# Altium footprint library PcbLib.PcbLib: 162 footprints (part 11 of 11)
Each footprint in its own frame and in the unit in brackets; x right, y up, seen from the top. Pads: shape width x height; smd on the part's side, far side on the other; paste and mask are expansions set on the pad; w line width, h text height; cw(c..) or ccw(c..) is an arc to the next point about the centre after c.
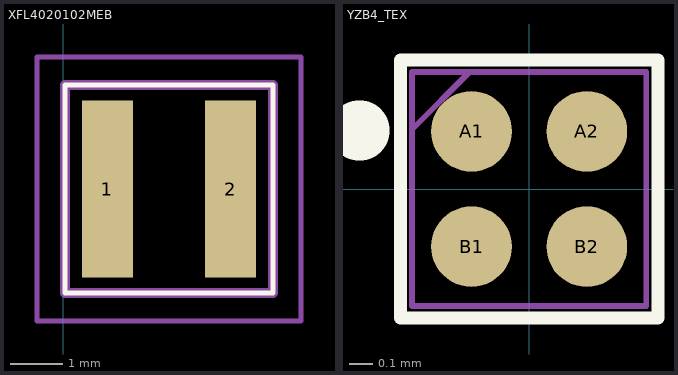
[diagram p10: the footprints below, top view; thin cyan lines are the x and y axes]

## XFL4020102MEB [mm]
pads (2):
  rect 0.98x3.4 smd: 1(0.847,-5.969) 2(3.217,-5.969)
Top Overlay:
  lines w0.1: 0.032,-7.969 4.032,-7.969 4.032,-3.969 0.032,-3.969 0.032,-7.969
Mechanical 13:
  lines w0.2: 0.032,-7.969 4.032,-7.969 4.032,-3.969 0.032,-3.969 0.032,-7.969
Mechanical 15:
  lines w0.1: -0.508,-8.509 4.572,-8.509 4.572,-3.429 -0.508,-3.429 -0.508,-8.509
3D body "XFL4020-102MEB.stp": height 2.2, standoff 0, extent 0.032,-7.969 4.032,-3.969

## YZB4_TEX [mm]
pads (4):
  round 0.35 smd paste+0 mask+0.05: A1(-0.25,0.25) A2(0.25,0.25) B1(-0.25,-0.25) B2(0.25,-0.25)
Top Overlay:
  circle w0.25: c-0.737,0.254 r0.006
  lines w0.056: -0.559,-0.559 -0.559,0.559 0.559,0.559 0.559,-0.559 -0.559,-0.559
Mechanical 13:
  lines w0.025: -0.508,0.258 -0.258,0.508 ; -0.508,-0.508 -0.508,0.508 0.508,0.508 0.508,-0.508 -0.508,-0.508
3D body "YZB4_TEX.step": height 0.63, standoff 0, extent -0.508,-0.508 0.508,0.508